# Altium schematic symbol library SN65HVD232DR.SchLib: 1 symbol
Pins are listed as number, name and electrical type; pins without a type are passive.

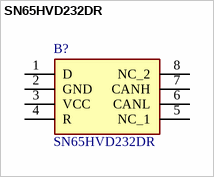
[diagram p0: symbol SN65HVD232DR]

## SN65HVD232DR
designator B?
3.3 V CAN Transceiver; Manufacturer_Name: Texas Instruments; Geometry.Height: 1.75mm; Mouser Part Number: 595-SN65HVD232DR; Mouser Price/Stock: https://www.mouser.co.uk/ProductDetail/Texas-Instruments/SN65HVD232DR?qs=QViXGNcIEAtY%252BrViRMr46w%3D%3D; Manufacturer_Part_Number: SN65HVD232DR; Datasheet Link: http://www.ti.com/lit/gpn/sn65hvd232
footprint SOIC127P600X175-8N
pins: 1 D, 2 GND, 3 VCC, 4 R, 5 NC_1, 6 CANL, 7 CANH, 8 NC_2